# Altium schematic symbol library 24V转5V芯片_TPS54560BDDAR.SCHLIB: 1 symbol
Pins are listed as number, name and electrical type; pins without a type are passive.

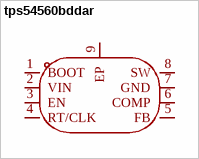
[diagram p0: symbol tps54560bddar]

## tps54560bddar
designator U??  (value not drawn)
功能类型:降压型;工作电压:4.5V~60V;输出电压:800mV~58.8V;输出电流:5A;输出类型:可调;; Manufacturer: TI(德州仪器); AddInBom: yes; ModelId: 3be500d54979453db96888fa439d0a60; ModelName: POWERPAD-SO-8_L4.9-W3.9-P1.27-LS6.0-BL-EP; ModelTransform: 192.913,236.22,0,0,0,0,0,0,0; Function: 降压型; Output Current: 5A; Frequency - Switching: 500kHz; Synchronous Rectifier: 否; Number of Outputs: 1; Topology: 降压式; Quiescent Current: 146uA; Switch tube (built-in/external): 内置; Output Type: 可调; Symbol: TPS54560BDDAR; LCSC Part Name: 降压型 5A 4.5V~60V; SupplierPart: C1850354; ManufacturerPart: TPS54560BDDAR; Supplier Footprint: SO-8; JLCPCB Part Class: Extended Part; Datasheet: https://www.ti.com/cn/lit/gpn/tps54560b; Supplier: LCSC; ConvertToPcb: yes; FootprintName: POWERPAD-SO-8_L4.9-W3.9-P1.27-LS6.0-BL-EP; Voltage - Supply: 4.5V~60V; Output Voltage: 800mV~58.8V; Operating Temperature: -40℃~+150℃@(TJ); Features: 轻载高效模式；逐波限流；频率同步；过流保护
footprint POWERPAD-SO-8_L4.9-W3.9-P1.27-LS6.0-BL-EP
pins: 1 BOOT, 2 VIN, 3 EN, 4 RT/CLK, 5 FB, 6 COMP, 7 GND, 8 SW, 9 EP